# Altium footprint library IoT_SYNTHPATCH.PcbLib: 65 footprints (part 4 of 5)
Each footprint in its own frame and in the unit in brackets; x right, y up, seen from the top. Pads: shape width x height; smd on the part's side, far side on the other; paste and mask are expansions set on the pad; w line width, h text height; cw(c..) or ccw(c..) is an arc to the next point about the centre after c.
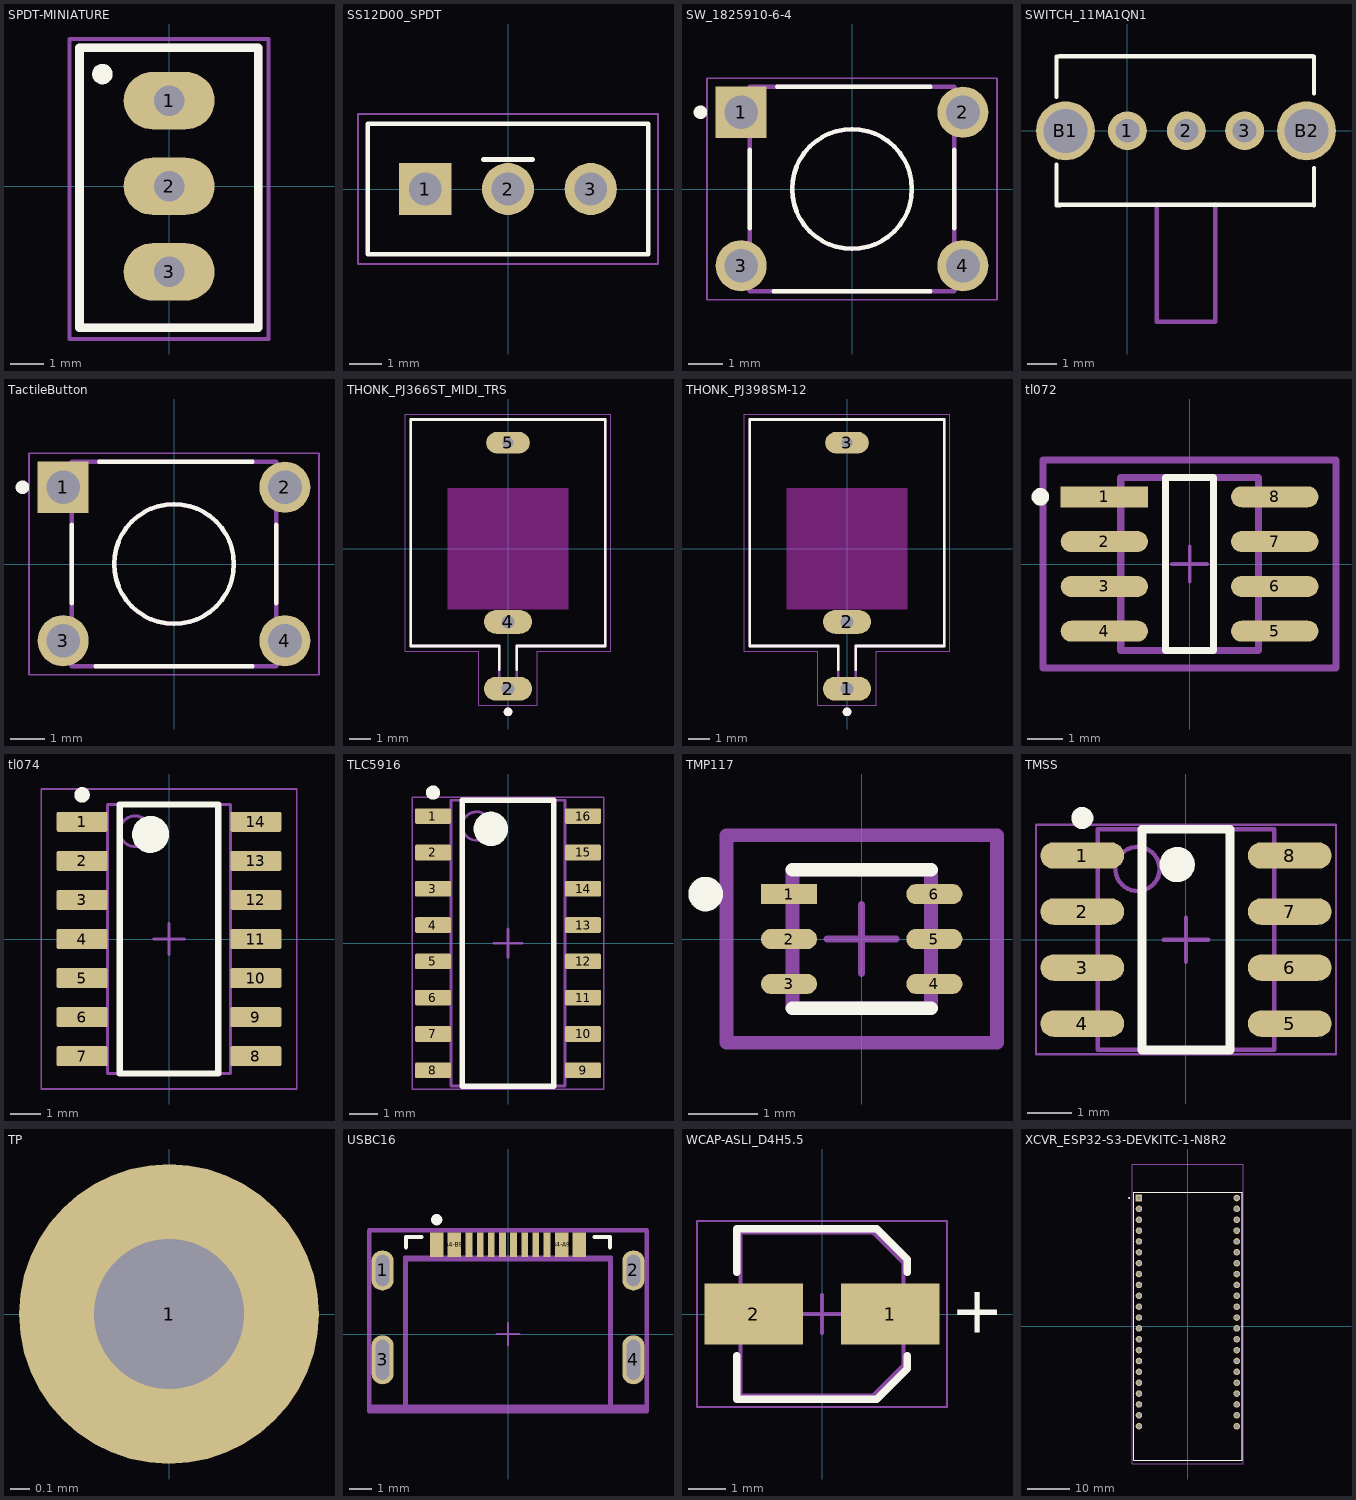
[diagram p3: the footprints below, top view; thin cyan lines are the x and y axes]

## SPDT-MINIATURE [mm]
pads (3):
  oval 2.7x1.7 hole 0.9 square: 1(0,2.54) 2(0,0) 3(0,-2.54)
Top Overlay:
  circle w0.254: c-1.981,3.327 r0.178
  region: -1.956,3.073 -1.726,3.315 -2.002,3.577 -2.231,3.334
  lines w0.254: -2.658,-4.191 -2.658,4.109 2.642,4.109 2.642,-4.191 -2.658,-4.191
Top Courtyard:
  lines w0.127: -2.954,-4.531 -2.954,4.369 2.946,4.369 2.946,-4.531 -2.954,-4.531
Top Assembly:
  lines w0.254: -2.658,-4.191 -2.658,4.109 2.642,4.109 2.642,-4.191 -2.658,-4.191

## SS12D00_SPDT [mm] "SS-12D00 SPDT slide switch, 3 pins 2.54 mm, body 8.5 x 4 mm"
height 10
pads (3):
  rect 1.6x1.6 hole 1: 1(-2.54,0.013)
  round 1.6 hole 1: 2(0,0.013) 3(2.54,0.013)
Top Overlay:
  lines w0.15: -0.75,0.913 0.75,0.913 ; -4.3,-1.987 4.3,-1.987 4.3,2.013 -4.3,2.013 -4.3,-1.987
Mechanical 15:
  lines w0.05: -4.6,-2.287 4.6,-2.287 4.6,2.313 -4.6,2.313 -4.6,-2.287

## SW_1825910-6-4 [mm]
pads (4):
  rect 1.498x1.498 / inner round 1.498 / far side rect 1.498x1.498 hole 0.99 mask+0.102: 1(-3.25,2.25)
  round 1.498 hole 0.99 mask+0.102: 2(3.25,2.25) 3(-3.25,-2.25) 4(3.25,-2.25)
Top Overlay:
  circle w0.2: c-4.445,2.25 r0.1
  circle w0.127: c0,0 r1.755
  lines w0.127: -2.995,-1.15 -2.995,1.15 ; -2.3,-2.995 2.3,-2.995 ; -2.2,2.995 2.3,2.995 ; 3,-1.15 3,1.15
Mechanical 13:
  circle w0.127: c0,0 r1.755
  lines w0.127: -2.995,-2.995 2.995,-2.995 2.995,2.995 -2.995,2.995 -2.995,-2.995
Mechanical 15:
  lines w0.05: -4.25,-3.25 4.25,-3.25 4.25,3.25 -4.25,3.25 -4.25,-3.25
3D body "step_temp.STEP": height 5.08, standoff -3.43, extent -3.773,-2.942 4.027,3.048

## SWITCH_11MA1QN1 [mil]
pads (5):
  round 52 hole 32 mask+4.02: 1(0,0) 2(79,0) 3(157,0)
  round 79 hole 59 mask+4.02: B1(-83,0) B2(240,0)
Top Overlay:
  lines w5: -95,-45 -95,-100 -90,-100 ; -95,45 -95,100 -90,100 ; 250,-100 250,-50 ; 250,50 250,100
  lines w6: -91,-99 248,-99 ; -91,100 -90,100 248,100
Mechanical 13:
  lines w6: 39,-99 39,-256 118,-256 118,-99
3D body "step_temp.STEP": height 185, standoff -110, extent -84.5,-238.5 254.5,91.5

## TactileButton [mm]
pads (4):
  rect 1.498x1.498 / inner round 1.498 / far side rect 1.498x1.498 hole 0.99 mask+0.102: 1(-3.25,2.25)
  round 1.498 hole 0.99 mask+0.102: 2(3.25,2.25) 3(-3.25,-2.25) 4(3.25,-2.25)
Top Overlay:
  circle w0.127: c0,0 r1.755
  circle w0.2: c-4.445,2.25 r0.1
  lines w0.127: -2.995,-1.15 -2.995,1.15 ; -2.3,-2.995 2.3,-2.995 ; -2.2,2.995 2.3,2.995 ; 3,-1.15 3,1.15
Mechanical 13:
  circle w0.127: c0,0 r1.755
  lines w0.127: -2.995,-2.995 -2.995,2.995 2.995,2.995 2.995,-2.995 -2.995,-2.995
Mechanical 15:
  lines w0.05: -4.25,-3.25 -4.25,3.25 4.25,3.25 4.25,-3.25 -4.25,-3.25
3D body "step_temp.STEP": height 5.08, standoff -3.43, extent -3.773,-2.942 4.027,3.048

## THONK_PJ366ST_MIDI_TRS [mm] "Stereo Thonkiconn (QingPu WQP-PJ366ST / WQP419GR) for MIDI TRS Type A: pad 5 = tip, 4 = ring, 2 = sleeve"
height 14.5
pads (3):
  oval 2.216x1.108 hole 0.6 square: 2(0,-6.48) 4(0,-3.38)
  oval 2.016x1.008 hole 0.5 square: 5(0,4.92)
Top Overlay:
  circle w0.2: c0,-7.55 r0.1
  lines w0.127: -0.4,-5.605 -0.4,-4.5 -4.5,-4.5 -4.5,6 4.5,6 4.5,-4.5 0.4,-4.5 0.4,-5.605
Keep-Out Layer:
  region: 2.8,-2.8 -2.8,-2.8 -2.8,2.8 2.8,2.8
Mechanical 13:
  circle w0.2: c0,-7.55 r0.1
  lines w0.127: -4.5,-4.5 -4.5,6 4.5,6 4.5,-4.5 0.4,-4.5 0.4,-6 -0.4,-6 -0.4,-4.5 -4.5,-4.5
Mechanical 15:
  lines w0.05: -4.75,-4.75 -1.36,-4.75 -1.36,-7.25 1.36,-7.25 1.36,-4.75 4.75,-4.75 4.75,6.25 -4.75,6.25 -4.75,-4.75
3D body "step_temp.STEP": height 14.5, standoff -3.5, extent -4.5,-7.55 4.5,6

## THONK_PJ398SM-12 [mm]
height 14.5
pads (3):
  oval 2.216x1.108 hole 0.6 square: 1(0,-6.48) 2(0,-3.38)
  oval 2.016x1.008 hole 0.5 square: 3(0,4.92)
Top Overlay:
  circle w0.2: c0,-7.55 r0.1
  lines w0.127: -0.4,-5.605 -0.4,-4.5 -4.5,-4.5 -4.5,6 4.5,6 4.5,-4.5 0.4,-4.5 0.4,-5.605
Keep-Out Layer:
  region: 2.8,-2.8 -2.8,-2.8 -2.8,2.8 2.8,2.8
Mechanical 13:
  circle w0.2: c0,-7.55 r0.1
  lines w0.127: -4.5,-4.5 -0.4,-4.5 -0.4,-6 0.4,-6 0.4,-4.5 4.5,-4.5 4.5,6 -4.5,6 -4.5,-4.5
Mechanical 15:
  lines w0.05: -4.75,-4.75 -4.75,6.25 4.75,6.25 4.75,-4.75 1.36,-4.75 1.36,-7.25 -1.36,-7.25 -1.36,-4.75 -4.75,-4.75
3D body "step_temp.STEP": height 14.5, standoff -3.5, extent -4.5,-7.55 4.5,6

## tl072 [mm]
pads (8):
  rect 2.474x0.592 smd paste+0 mask+0: 1(-2.416,1.905)
  rrect100% 2.474x0.592 smd paste+0 mask+0: 2(-2.416,0.635) 3(-2.416,-0.635) 4(-2.416,-1.905) 5(2.416,-1.905) 6(2.416,-0.635) 7(2.416,0.635) 8(2.416,1.905)
Top Overlay:
  circle w0.25: c-4.228,1.905 r0.125
  lines w0.2: -0.679,-2.45 0.679,-2.45 0.679,2.45 -0.679,2.45 -0.679,-2.45
Top 3D Body:
  lines w0.2: -1.95,-2.45 1.95,-2.45 1.95,2.45 -1.95,2.45 -1.95,-2.45
Top Courtyard:
  lines w0.2: -4.153,-2.95 4.153,-2.95 4.153,2.95 -4.153,2.95 -4.153,-2.95
Top Assembly:
  lines w0.2: -4.153,-2.95 4.153,-2.95 4.153,2.95 -4.153,2.95 -4.153,-2.95
  text ".Designator" at 0,0.187 h1
Top Component Center:
  lines w0.1: -0.5,0 0.5,0 ; 0,-0.5 0,0.5
3D body "IC_STMicroelectronics_M41T00M6F_eec.STEP": height 0.25, standoff 0, extent -4.153,-2.95 4.153,2.95

## tl074 [mm] "SOIC, 14-Leads, Body 8.75x4mm, Pitch 1.27mm, IPC Low Density"
height 1.75
pads (14):
  rrect15% 1.65x0.65 smd: 1(-2.825,3.81) 2(-2.825,2.54) 3(-2.825,1.27) 4(-2.825,0) 5(-2.825,-1.27) 6(-2.825,-2.54) 7(-2.825,-3.81) 8(2.825,-3.81) 9(2.825,-2.54) 10(2.825,-1.27) 11(2.825,0) 12(2.825,1.27) 13(2.825,2.54) 14(2.825,3.81)
Top Overlay:
  circle w0.25: c-2.825,4.685 r0.125
  circle w0.6: c-0.6,3.4 r0.3
  lines w0.2: -1.6,-4.375 -1.6,4.375 1.6,4.375 1.6,-4.375 -1.6,-4.375
Mechanical 1:
  text ".Designator" at -1.575,-0.325 h0.8
Mechanical 13:
  circle w0.1: c-1.1,3.5 r0.5
  lines w0.1: -2,-4.375 -2,4.375 2,4.375 2,-4.375 -2,-4.375
Mechanical 15:
  lines w0.05: -4.15,-4.875 -4.15,4.875 4.15,4.875 4.15,-4.875 -4.15,-4.875
  lines w0.1: -0.5,0 0.5,0 ; 0,-0.5 0,0.5
3D body "SOIC-14akaD0014AakaM14A.stp": height 1.59, standoff -0.01, extent -3.023,-4.318 3.022,4.318

## TLC5916 [mm] "SOIC, 16-Leads, Body 10x4mm, Pitch 1.27mm, IPC High Density"
height 1.75
pads (16):
  rrect18% 1.25x0.55 smd: 1(-2.625,4.445) 2(-2.625,3.175) 3(-2.625,1.905) 4(-2.625,0.635) 5(-2.625,-0.635) 6(-2.625,-1.905) 7(-2.625,-3.175) 8(-2.625,-4.445) 9(2.625,-4.445) 10(2.625,-3.175) 11(2.625,-1.905) 12(2.625,-0.635) 13(2.625,0.635) 14(2.625,1.905) 15(2.625,3.175) 16(2.625,4.445)
Top Overlay:
  circle w0.25: c-2.625,5.27 r0.125
  circle w0.6: c-0.6,4 r0.3
  lines w0.2: -1.6,-5 -1.6,5 1.6,5 1.6,-5 -1.6,-5
Mechanical 1:
  text ".Designator" at -1.531,-0.319 h0.8
Mechanical 13:
  circle w0.1: c-1.1,4.1 r0.5
  lines w0.1: -2,-5 -2,5 2,5 2,-5 -2,-5
Mechanical 15:
  lines w0.05: -3.35,-5.1 -3.35,5.1 3.35,5.1 3.35,-5.1 -3.35,-5.1
  lines w0.1: -0.5,0 0.5,0 ; 0,-0.5 0,0.5
3D body "SOIC-16akaD0016AakaM16A.stp": height 1.59, standoff -0.01, extent -2.997,-4.953 2.997,4.953

## TMP117 [mm]
pads (6):
  rect 0.811x0.292 smd paste+0 mask+0: 1(-1.051,0.65)
  rrect100% 0.811x0.292 smd paste+0 mask+0: 2(-1.051,0) 3(-1.051,-0.65) 4(1.051,-0.65) 5(1.051,0) 6(1.051,0.65)
Top Overlay:
  circle w0.25: c-2.256,0.65 r0.125
  lines w0.2: -1,-1 1,-1 ; -1,1 1,1
Top 3D Body:
  lines w0.2: -1,-1 1,-1 1,1 -1,1 -1,-1
Top Courtyard:
  lines w0.2: -1.956,-1.5 1.956,-1.5 1.956,1.5 -1.956,1.5 -1.956,-1.5
Top Assembly:
  lines w0.2: -1.956,-1.5 1.956,-1.5 1.956,1.5 -1.956,1.5 -1.956,-1.5
  text ".Designator" at 0,-0.001 h1
Top Component Center:
  lines w0.1: -0.5,0 0.5,0 ; 0,-0.5 0,0.5
3D body "IC_Texas_Instruments_TMP116NAIDRVR_eec.STEP": height 0.25, standoff 0, extent -1.956,-1.5 1.956,1.5

## TMSS [mm] "SOIC, 8-Leads, Body 4.9x3.9mm, Pitch 1.27mm, IPC High Density"
height 1.75
pads (8):
  oval 1.9x0.6 smd: 1(-2.35,1.905) 2(-2.35,0.635) 3(-2.35,-0.635) 4(-2.35,-1.905) 5(2.35,-1.905) 6(2.35,-0.635) 7(2.35,0.635) 8(2.35,1.905)
Top Overlay:
  circle w0.4: c-0.2,1.7 r0.2
  circle w0.25: c-2.35,2.755 r0.125
  lines w0.2: -1,-2.5 1,-2.5 1,2.5 -1,2.5 -1,-2.5
Mechanical 13:
  circle w0.1: c-1.1,1.6 r0.5
  lines w0.1: -2,-2.5 2,-2.5 2,2.5 -2,2.5 -2,-2.5
Mechanical 15:
  lines w0.05: -3.4,-2.6 3.4,-2.6 3.4,2.6 -3.4,2.6 -3.4,-2.6
  lines w0.1: -0.5,0 0.5,0 ; 0,-0.5 0,0.5
3D body: height 1.75, standoff 0.1, extent -2,-2.5 2,2.5

## TP [mil]
pads (1):
  round 60 hole 30: 1(0,0)

## USBC16 [mm]
pads (16):
  rrect100% 1x1.8 hole 1.4 slot 0.6 at 0 deg paste-2539.97 mask+0: 1(-5.62,2.85) 2(5.62,2.85)
  rrect100% 1x2.2 hole 1.8 slot 0.6 at 0 deg paste-2539.97 mask+0: 3(-5.62,-1.15) 4(5.62,-1.15)
  rect 0.6x1.1 smd paste+0 mask+0: A1-B12(-3.2,4) A4-B9(-2.4,4) B1-A12(3.2,4) B4-A9(2.4,4)
  rect 0.3x1.1 smd paste+0 mask+0: A5(-1.25,4) A6(-0.25,4) A7(0.25,4) A8(1.25,4) B5(1.75,4) B6(0.75,4) B7(-0.75,4) B8(-1.75,4)
Top Overlay:
  circle w0.25: c-3.195,5.125 r0.125
  lines w0.2: -4.57,3.9 -4.57,4.35 -3.875,4.35 ; 3.875,4.35 4.57,4.35 4.57,3.9
Top 3D Body:
  lines w0.2: -6.22,-3.25 6.22,-3.25 ; -4.57,-3.35 4.57,-3.35 4.57,3.35 -4.57,3.35 -4.57,-3.35
Top Courtyard:
  lines w0.2: -6.22,-3.45 6.22,-3.45 6.22,4.65 -6.22,4.65 -6.22,-3.45
Board:
  lines w0.15: -4.62,-3.25 -4.62,3.45 4.62,3.45 4.62,-3.25
Top Assembly:
  lines w0.2: -6.22,-3.45 6.22,-3.45 6.22,4.65 -6.22,4.65 -6.22,-3.45
  text ".Designator" at 0,0.787 h1
Top Component Center:
  lines w0.1: -0.5,0 0.5,0 ; 0,-0.5 0,0.5
3D body "Conn_Molex_216990-0002_eec.STEP": height 0.25, standoff 0, extent -6.22,-3.45 6.22,4.65

## WCAP-ASLI_D4H5.5 [mm] "Aluminium Electrolytic V-Chip SMT Capacitors, 4x5.5mm"
height 5.5
pads (2):
  rect 2.6x1.6 smd: 1(1.8,0) 2(-1.8,0)
Top Overlay:
  lines w0.2: -2.25,-1.1 -2.25,-2.25 1.45,-2.25 2.25,-1.45 2.25,-1.1 ; -2.25,1.1 -2.25,2.25 1.45,2.25 2.25,1.45 2.25,1.1
  text "+" at 3.4,-0.5 h1.22
Top 3D Body:
  lines w0.1: -2.15,-2.15 -2.15,2.15 1.35,2.15 2.15,1.35 2.15,-1.35 1.35,-2.15 -2.15,-2.15
Top Courtyard:
  lines w0.05: -3.3,-2.45 -3.3,2.45 3.3,2.45 3.3,-2.45 -3.3,-2.45
Top Assembly:
  lines w0.1: -2.15,-2.15 -2.15,2.15 1.35,2.15 2.15,1.35 2.15,-1.35 1.35,-2.15 -2.15,-2.15
Top Designator:
  text ".Designator" at -3.647,-0.357 h1
Top Component Center:
  lines w0.1: -0.5,0 0.5,0 ; 0,-0.5 0,0.5
3D body "4x5.5x1.stp": height 5.5, standoff 0, extent -2.5,-2.15 2.5,2.15

## XCVR_ESP32-S3-DEVKITC-1-N8R2 [mm]
pads (44):
  rect 1.53x1.53 / inner round 1.53 / far side rect 1.53x1.53 hole 1.02: J1_1(-11.43,29.97)
  round 1.53 hole 1.02: J1_2(-11.43,27.43) J1_3(-11.43,24.89) J1_4(-11.43,22.35) J1_5(-11.43,19.81) J1_6(-11.43,17.27) J1_7(-11.43,14.73) J1_8(-11.43,12.19) J1_9(-11.43,9.65) J1_10(-11.43,7.11) J1_11(-11.43,4.57) J1_12(-11.43,2.03) J1_13(-11.43,-0.51) J1_14(-11.43,-3.05) J1_15(-11.43,-5.59) J1_16(-11.43,-8.13) J1_17(-11.43,-10.67) J1_18(-11.43,-13.21) J1_19(-11.43,-15.75) J1_20(-11.43,-18.29) J1_21(-11.43,-20.83) J1_22(-11.43,-23.37) J3_1(11.43,29.97) J3_2(11.43,27.43) J3_3(11.43,24.89) J3_4(11.43,22.35) J3_5(11.43,19.81) J3_6(11.43,17.27) J3_7(11.43,14.73) J3_8(11.43,12.19) J3_9(11.43,9.65) J3_10(11.43,7.11) J3_11(11.43,4.57) J3_12(11.43,2.03) J3_13(11.43,-0.51) J3_14(11.43,-3.05) J3_15(11.43,-5.59) J3_16(11.43,-8.13) J3_17(11.43,-10.67) J3_18(11.43,-13.21) J3_19(11.43,-15.75) J3_20(11.43,-18.29) J3_21(11.43,-20.83) J3_22(11.43,-23.37)
Top Overlay:
  circle w0.2: c-13.716,29.972 r0.1
  lines w0.127: -12.7,-31.37 12.7,-31.37 12.7,31.37 -12.7,31.37 -12.7,-31.37
Mechanical 13:
  circle w0.2: c-13.716,29.972 r0.1
  lines w0.127: -12.7,-31.37 12.7,-31.37 12.7,31.37 -12.7,31.37 -12.7,-31.37
Mechanical 15:
  lines w0.05: -12.95,-32.21 12.95,-32.21 12.95,37.92 -12.95,37.92 -12.95,-32.21
3D body "step_temp.STEP": height 7.39, standoff -6, extent -12.7,-31.96 12.7,37.68